# Altium footprint library UCP.PcbLib: 222 footprints (part 1 of 14)
Each footprint in its own frame and in the unit in brackets; x right, y up, seen from the top. Pads: shape width x height; smd on the part's side, far side on the other; paste and mask are expansions set on the pad; w line width, h text height; cw(c..) or ccw(c..) is an arc to the next point about the centre after c.
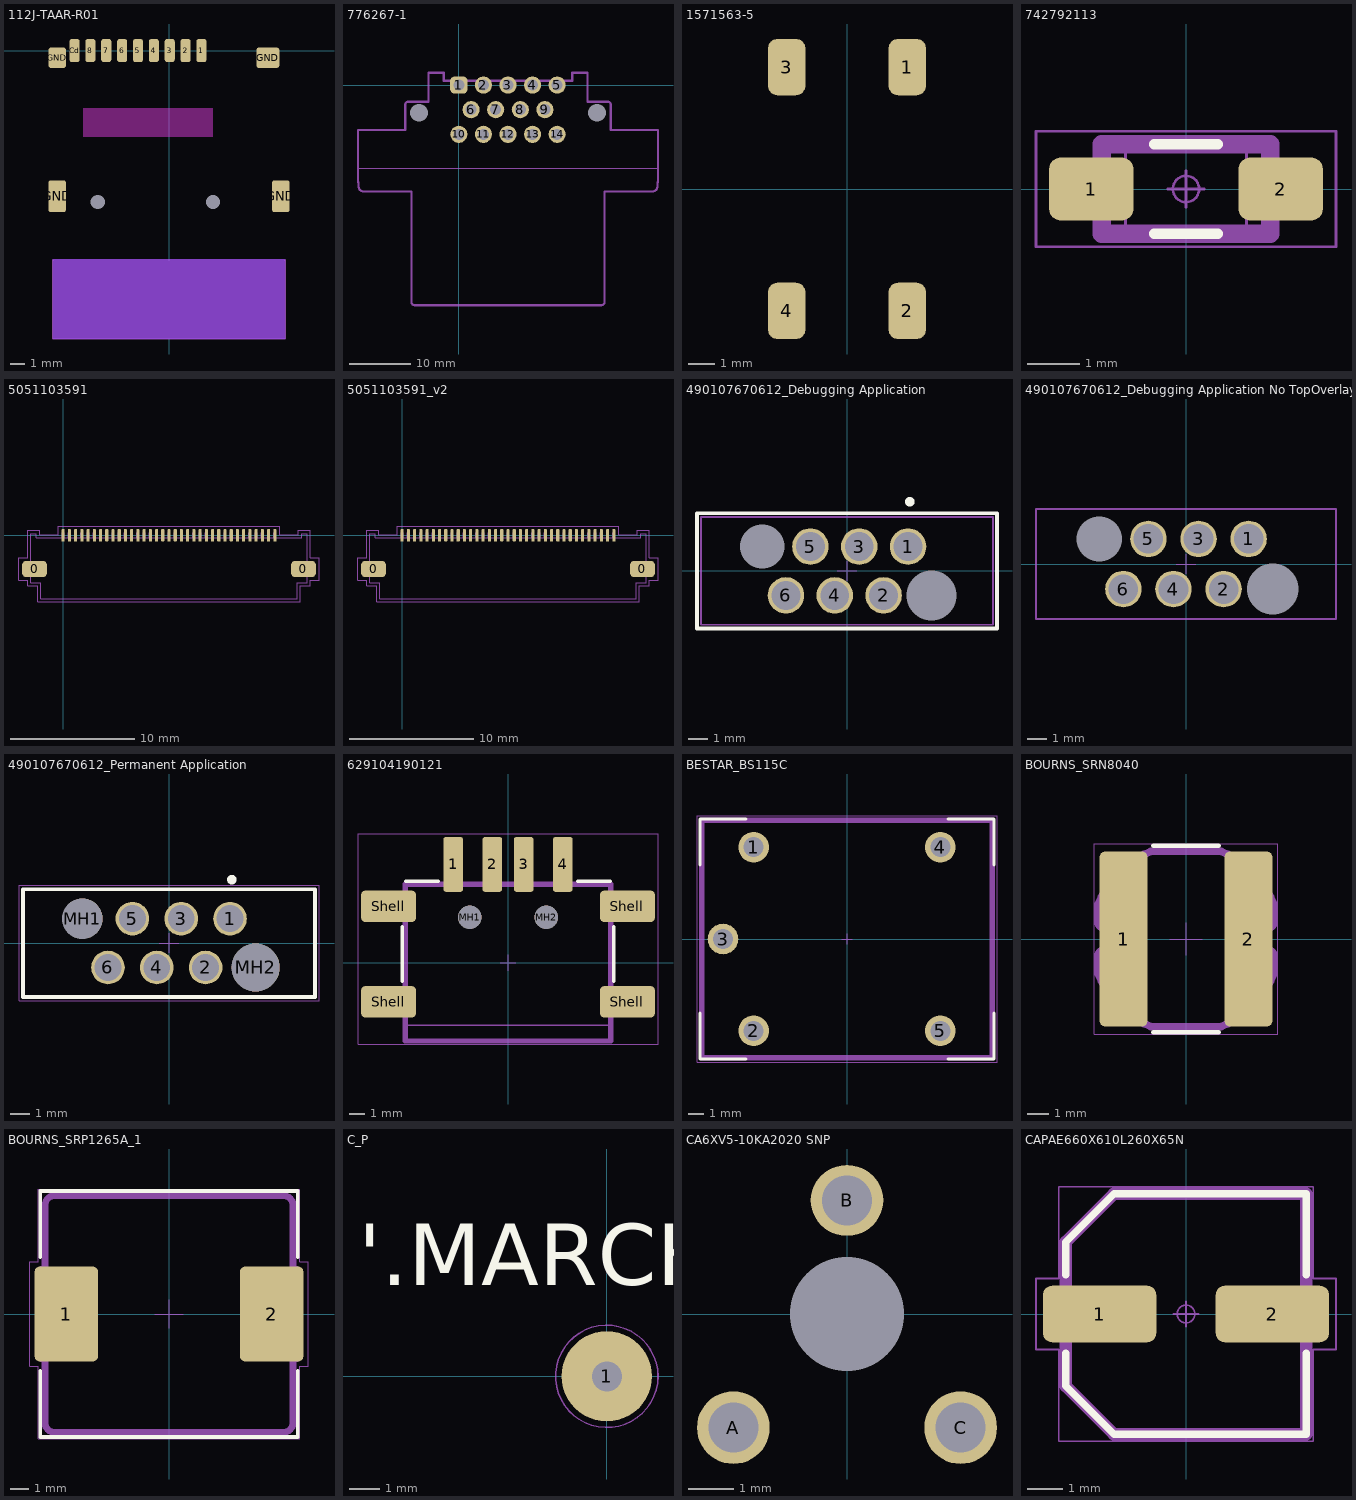
[diagram p0: the footprints below, top view; thin cyan lines are the x and y axes]

## 112J-TAAR-R01 [mm] "CARD HOLDER"
height 1.85
pads (15):
  rrect50% 0.7x1.6 smd: 1(2.25,0) 2(1.15,0) 3(0.05,0) 4(-1.05,0) 5(-2.15,0) 6(-3.25,0) 7(-4.35,0) 8(-5.45,0) Cd(-6.55,0)
  rrect25% 1.2x2.2 smd: GND(-7.75,-10.1) GND(7.75,-10.1)
  rrect25% 1.2x1.4 smd: GND(-7.744,-0.5)
  rrect25% 1.6x1.4 smd: GND(6.85,-0.5)
  round 0 hole 1 unplated mask+0.25: MH1(-4.95,-10.5) MH2(3.05,-10.5)
Top Layer keep-out:
  rectangle: -8.05,-20 8.05,-14.5
  rectangle: -5.95,-6 3.05,-4
Bottom Layer keep-out:
  rectangle: -8.05,-20 8.05,-14.5
Top Designator:
  text ".Designator" at -4.511,-0.453 h2
Top Dimensions:
  lines w0.1: -8.05,-20 8.05,-20 8.05,-14.5 -8.05,-14.5 -8.05,-20
3D body "112J-TDAR-R01.stp": height 1.9, standoff -0.55, extent -8.05,-14.5 8.05,0.503

## 776267-1 [mm]
pads (16):
  round 0 hole 2.9 unplated mask+0.25: 0(-6.5,-4.5) 0(22.5,-4.5)
  rrect50% 2.8x2.8 hole 1.8: 1(0,0)
  round 2.8 hole 1.8: 2(4,0) 3(8,0) 4(12,0) 5(16,0) 6(2,-4) 7(6,-4) 8(10,-4) 9(14,-4) 10(0,-8) 11(4,-8) 12(8,-8) 13(12,-8) 14(16,-8)
Top Designator:
  text ".Designator" at -4.511,-0.453 h2
Top Assembly:
  lines w0.35: -16.4,-15.8 -16.3,-15.8 -16.3,-16.5 ccw(c-15.5,-16.5) -15.5,-17.3 -11.4,-17.3 -7.7,-17.3 -7.7,-35.3 ccw(c-7.2,-35.3) -7.2,-35.8 -1.5,-35.8 3.456,-35.8 3.473,-35.8 5.327,-35.8 5.344,-35.8 10.656,-35.8 10.673,-35.8 12.527,-35.8 12.544,-35.8 17.5,-35.8 23.2,-35.8 ccw(c23.2,-35.3) 23.7,-35.3 23.7,-17.3 27.4,-17.3 31.5,-17.3 ccw(c31.5,-16.5) 32.3,-16.5 32.3,-15.8 32.4,-15.8 32.4,-14.3 32.4,-13.434 32.4,-9 32.4,-7.3 32.375,-7.3 30.301,-7.3 29.932,-7.3 29.58,-7.3 29.201,-7.3 28.985,-7.3 27.485,-7.3 24.725,-7.3 24.725,-3.2 ccw(c24.225,-3.2) 24.225,-2.7 20.925,-2.7 20.925,0 20.925,2 20.025,2 18.445,2 18.445,0.7 -2.445,0.7 -2.445,2 -4.025,2 -4.925,2 -4.925,0 -4.925,-2.7 -8.225,-2.7 ccw(c-8.225,-3.2) -8.725,-3.2 -8.725,-7.3 -11.485,-7.3 -12.985,-7.3 -13.201,-7.3 -14.701,-7.3 -16.375,-7.3 -16.4,-7.3 -16.4,-9 -16.4,-15.8
Top Component Outline:
  lines w0.2: -16.4,-13.51 32.324,-13.51
3D body "776273-1.stp": height 27.77, standoff -4.33, extent -16.4,-35.8 32.4,2

## 1571563-5 [mm] "Tactile Switches"
height 13.6
pads (4):
  rrect50% 1.4x2.1 smd: 1(2.25,4.55) 2(2.25,-4.55) 3(-2.25,4.55) 4(-2.25,-4.55)
Top Designator:
  text ".Designator" at -4.511,-0.453 h2
3D body "c-1571563-5-v-3d.stp": height 13.07, standoff 0, extent -3,-5 3,5

## 742792113 [mm] "Ferrit bead, Chip; 3.2 mm L X 1.60 mm W X 1.1 mm H body"
height 1.1
pads (2):
  rrect36% 1.6x1.2 smd: 1(-1.8,0) 2(1.8,0)
Top Overlay:
  lines w0.2: -0.605,-0.85 0.605,-0.85 ; -0.605,0.85 0.605,0.85
Top Designator:
  text ".Designator" at 0,0 h1.2
Top Assembly:
  lines w0.35: -1.6,-0.85 1.6,-0.85 1.6,0.85 -1.6,0.85 -1.6,-0.85
Top Courtyard:
  circle w0.05: c0,0 r0.25
  lines w0.05: -0.35,0 0.35,0 ; 0,-0.35 0,0.35 ; -2.85,-1.1 2.85,-1.1 2.85,1.1 -2.85,1.1 -2.85,-1.1
Top Component Outline:
  lines w0.05: -1.55,-0.8 1.55,-0.8 1.55,0.8 -1.55,0.8 -1.55,-0.8
Top Component Terminal:
  lines w0.05: -1.55,-0.8 -1.55,0.8 -1.15,0.8 -1.15,-0.8 -1.55,-0.8 ; 1.15,-0.8 1.55,-0.8 1.55,0.8 1.15,0.8 1.15,-0.8
3D body "RESC310X160X65L40.STEP": height 0.65, standoff 0, extent -1.55,-0.8 1.55,0.8

## 5051103591 [mm] "Connector"
pads (37):
  rrect50% 2x1.3 smd mask+0.05: 0(-2.3,-2.7) 0(19.3,-2.7)
  rrect50% 0.25x1 smd mask+0.05: 1(0,0) 2(0.5,0) 3(1,0) 4(1.5,0) 5(2,0) 6(2.5,0) 7(3,0) 8(3.5,0) 9(4,0) 10(4.5,0) 11(5,0) 12(5.5,0) 13(6,0) 14(6.5,0) 15(7,0) 16(7.5,0) 17(8,0) 18(8.5,0) 19(9,0) 20(9.5,0) 21(10,0) 22(10.5,0) 23(11,0) 24(11.5,0) 25(12,0) 26(12.5,0) 27(13,0) 28(13.5,0) 29(14,0) 30(14.5,0) 31(15,0) 32(15.5,0) 33(16,0) 34(16.5,0) 35(17,0)
Top Solder:
  region: -0.1,0.55 17.1,0.55 17.12,0.55 17.157,0.535 17.185,0.507 17.2,0.47 17.2,0.45 17.2,-0.45 17.2,-0.47 17.185,-0.507 17.157,-0.535 17.12,-0.55 17.1,-0.55 -0.1,-0.55 -0.12,-0.55 -0.157,-0.535 -0.185,-0.507 -0.2,-0.47 -0.2,-0.45 -0.2,0.45 -0.2,0.47 -0.185,0.507 -0.157,0.535 -0.12,0.55
Top Designator:
  text ".Designator" at -4.511,-0.453 h2
Top Assembly:
  lines w0.05: 0,-0.2 0,0.2 ; 0.5,-0.2 0.5,0.2 ; 1,-0.2 1,0.2 ; 1.5,-0.2 1.5,0.2 ; 2,-0.2 2,0.2 ; 2.5,-0.2 2.5,0.2 ; 3,-0.2 3,0.2 ; 3.5,-0.2 3.5,0.2 ; 4,-0.2 4,0.2 ; 4.5,-0.2 4.5,0.2 ; 5,-0.2 5,0.2 ; 5.5,-0.2 5.5,0.2 ; 6,-0.2 6,0.2 ; 6.5,-0.2 6.5,0.2 ; 7,-0.2 7,0.2 ; 7.5,-0.2 7.5,0.2 ; 8,-0.2 8,0.2 ; 8.5,-0.2 8.5,0.2 ; 9,-0.2 9,0.2 ; 9.5,-0.2 9.5,0.2 ; 10,-0.2 10,0.2 ; 10.5,-0.2 10.5,0.2 ; 11,-0.2 11,0.2 ; 11.5,-0.2 11.5,0.2 ; 12,-0.2 12,0.2 ; 12.5,-0.2 12.5,0.2 ; 13,-0.2 13,0.2 ; 13.5,-0.2 13.5,0.2 ; 14,-0.2 14,0.2 ; 14.5,-0.2 14.5,0.2 ; 15,-0.2 15,0.2 ; 15.5,-0.2 15.5,0.2 ; 16,-0.2 16,0.2 ; 16.5,-0.2 16.5,0.2 ; 17,-0.2 17,0.2 ; -3,-3.15 -2.6,-3.15 -2.6,-3.8 -1.8,-3.8 -1.8,-5.1 18.8,-5.1 18.8,-3.8 19.6,-3.8 19.6,-3.15 20,-3.15 20,-2.25 19.6,-2.25 19.6,0.15 19.15,0.15 19.15,-0.2 -2.15,-0.2 -2.15,0.15 -2.6,0.15 -2.6,-2.25 -3,-2.25 -3,-3.15
Top Courtyard:
  lines w0.05: -3.55,-3.6 -3.55,-1.8 -2.85,-1.8 -2.85,0.4 -1.9,0.4 -1.9,0.05 -0.4,0.05 -0.4,0.75 17.4,0.75 17.4,0.05 18.9,0.05 18.9,0.4 19.85,0.4 19.85,-1.8 20.55,-1.8 20.55,-3.6 19.85,-3.6 19.85,-4.05 19.05,-4.05 19.05,-5.35 -2.05,-5.35 -2.05,-4.05 -2.85,-4.05 -2.85,-3.6 -3.55,-3.6
Top Component Outline:
  lines w0.02: -2.6,-3.8 -2.6,0.15 -2.15,0.15 -2.15,-0.2 19.15,-0.2 19.15,0.15 19.6,0.15 19.6,-3.8 18.8,-3.8 18.8,-5.1 -1.8,-5.1 -1.8,-3.8 -2.6,-3.8
Top Component Terminal:
  drawing of 156 lines, arcs and shapes, not listed
3D body "5051103591.stp": height 1.88, standoff -0.02, extent -3,-5.1 20,0.2

## 5051103591_v2 [mm] "Connector"
pads (37):
  rrect50% 2x1.3 smd mask+0.05: 0(-2.3,-2.7) 0(19.3,-2.7)
  rrect50% 0.25x1 smd mask+0.05: 1(0,0) 2(0.5,0) 3(1,0) 4(1.5,0) 5(2,0) 6(2.5,0) 7(3,0) 8(3.5,0) 9(4,0) 10(4.5,0) 11(5,0) 12(5.5,0) 13(6,0) 14(6.5,0) 15(7,0) 16(7.5,0) 17(8,0) 18(8.5,0) 19(9,0) 20(9.5,0) 21(10,0) 22(10.5,0) 23(11,0) 24(11.5,0) 25(12,0) 26(12.5,0) 27(13,0) 28(13.5,0) 29(14,0) 30(14.5,0) 31(15,0) 32(15.5,0) 33(16,0) 34(16.5,0) 35(17,0)
Top Designator:
  text ".Designator" at -4.511,-0.453 h2
Top Assembly:
  lines w0.05: 0,-0.2 0,0.2 ; 0.5,-0.2 0.5,0.2 ; 1,-0.2 1,0.2 ; 1.5,-0.2 1.5,0.2 ; 2,-0.2 2,0.2 ; 2.5,-0.2 2.5,0.2 ; 3,-0.2 3,0.2 ; 3.5,-0.2 3.5,0.2 ; 4,-0.2 4,0.2 ; 4.5,-0.2 4.5,0.2 ; 5,-0.2 5,0.2 ; 5.5,-0.2 5.5,0.2 ; 6,-0.2 6,0.2 ; 6.5,-0.2 6.5,0.2 ; 7,-0.2 7,0.2 ; 7.5,-0.2 7.5,0.2 ; 8,-0.2 8,0.2 ; 8.5,-0.2 8.5,0.2 ; 9,-0.2 9,0.2 ; 9.5,-0.2 9.5,0.2 ; 10,-0.2 10,0.2 ; 10.5,-0.2 10.5,0.2 ; 11,-0.2 11,0.2 ; 11.5,-0.2 11.5,0.2 ; 12,-0.2 12,0.2 ; 12.5,-0.2 12.5,0.2 ; 13,-0.2 13,0.2 ; 13.5,-0.2 13.5,0.2 ; 14,-0.2 14,0.2 ; 14.5,-0.2 14.5,0.2 ; 15,-0.2 15,0.2 ; 15.5,-0.2 15.5,0.2 ; 16,-0.2 16,0.2 ; 16.5,-0.2 16.5,0.2 ; 17,-0.2 17,0.2 ; -3,-3.15 -3,-2.25 -2.6,-2.25 -2.6,0.15 -2.15,0.15 -2.15,-0.2 19.15,-0.2 19.15,0.15 19.6,0.15 19.6,-2.25 20,-2.25 20,-3.15 19.6,-3.15 19.6,-3.8 18.8,-3.8 18.8,-5.1 -1.8,-5.1 -1.8,-3.8 -2.6,-3.8 -2.6,-3.15 -3,-3.15
Top Courtyard:
  lines w0.05: -3.55,-3.6 -2.85,-3.6 -2.85,-4.05 -2.05,-4.05 -2.05,-5.35 19.05,-5.35 19.05,-4.05 19.85,-4.05 19.85,-3.6 20.55,-3.6 20.55,-1.8 19.85,-1.8 19.85,0.4 18.9,0.4 18.9,0.05 17.4,0.05 17.4,0.75 -0.4,0.75 -0.4,0.05 -1.9,0.05 -1.9,0.4 -2.85,0.4 -2.85,-1.8 -3.55,-1.8 -3.55,-3.6
Top Component Outline:
  lines w0.02: -2.6,-3.8 -1.8,-3.8 -1.8,-5.1 18.8,-5.1 18.8,-3.8 19.6,-3.8 19.6,0.15 19.15,0.15 19.15,-0.2 -2.15,-0.2 -2.15,0.15 -2.6,0.15 -2.6,-3.8
Top Component Terminal:
  drawing of 156 lines, arcs and shapes, not listed
3D body "5051103591.stp": height 1.88, standoff -0.02, extent -3,-5.1 20,0.2

## 490107670612_Debugging Application [mm] "REDFIT IDC SKEDD Connector, pitch 2.54mm, 6p"
height 10.45
pads (8):
  round 1.9 hole 1.5 mask+0.055: 1(3.175,1.27) 2(1.905,-1.27) 3(0.635,1.27) 4(-0.635,-1.27) 5(-1.905,1.27) 6(-3.175,-1.27)
  round 0 hole 2.3 unplated mask+0.1: MH1(-4.405,1.27)
  round 0 hole 2.6 unplated mask+0.1: MH2(4.405,-1.27)
Top Overlay:
  circle w0.25: c3.27,3.6 r0.125
  lines w0.2: -7.805,-3 -7.805,3 7.805,3 7.805,-3 -7.805,-3
Top Solder:
  region: 3.473,-2.315 3.593,-2.422 3.877,-2.577 4.189,-2.663 4.512,-2.675 4.83,-2.614 5.125,-2.482 5.382,-2.286 5.588,-2.036 5.731,-1.747 5.805,-1.432 5.805,-1.108 5.731,-0.793 5.588,-0.504 5.382,-0.254 5.125,-0.058 4.83,0.074 4.512,0.135 4.189,0.123 3.877,0.037 3.593,-0.118 3.473,-0.225 3.354,-0.316 3.084,-0.44 2.789,-0.479 2.495,-0.429 2.357,-0.372 2.242,-0.315 1.991,-0.26 1.734,-0.271 1.487,-0.347 1.268,-0.482 1.09,-0.668 0.965,-0.892 0.9,-1.141 0.9,-1.399 0.965,-1.648 1.09,-1.872 1.268,-2.058 1.487,-2.193 1.734,-2.269 1.991,-2.28 2.242,-2.225 2.357,-2.168 2.495,-2.111 2.789,-2.061 3.084,-2.1 3.354,-2.224
  region: -2.474,0.441 -2.36,0.364 -2.101,0.275 -1.827,0.259 -1.558,0.317 -1.315,0.445 -1.116,0.633 -0.974,0.868 -0.9,1.133 -0.9,1.407 -0.974,1.672 -1.116,1.907 -1.315,2.095 -1.558,2.223 -1.827,2.281 -2.101,2.265 -2.36,2.176 -2.474,2.099 -2.475,2.101 -2.608,2.041 -2.893,1.984 -3.183,2.011 -3.453,2.12 -3.573,2.203 -3.68,2.299 -3.934,2.437 -4.212,2.513 -4.501,2.525 -4.784,2.47 -5.048,2.352 -5.277,2.177 -5.461,1.954 -5.589,1.695 -5.655,1.414 -5.655,1.126 -5.589,0.845 -5.461,0.586 -5.277,0.363 -5.048,0.188 -4.784,0.07 -4.501,0.015 -4.212,0.027 -3.934,0.103 -3.68,0.241 -3.573,0.337 -3.453,0.42 -3.183,0.529 -2.893,0.556 -2.608,0.499 -2.475,0.439
Bottom Solder:
  region: 3.473,-2.315 3.593,-2.422 3.877,-2.577 4.189,-2.663 4.512,-2.675 4.83,-2.614 5.125,-2.482 5.382,-2.286 5.588,-2.036 5.731,-1.747 5.805,-1.432 5.805,-1.108 5.731,-0.793 5.588,-0.504 5.382,-0.254 5.125,-0.058 4.83,0.074 4.512,0.135 4.189,0.123 3.877,0.037 3.593,-0.118 3.473,-0.225 3.354,-0.316 3.084,-0.44 2.789,-0.479 2.495,-0.429 2.357,-0.372 2.242,-0.315 1.991,-0.26 1.734,-0.271 1.487,-0.347 1.268,-0.482 1.09,-0.668 0.965,-0.892 0.9,-1.141 0.9,-1.399 0.965,-1.648 1.09,-1.872 1.268,-2.058 1.487,-2.193 1.734,-2.269 1.991,-2.28 2.242,-2.225 2.357,-2.168 2.495,-2.111 2.789,-2.061 3.084,-2.1 3.354,-2.224
  region: -2.474,0.441 -2.36,0.364 -2.101,0.275 -1.827,0.259 -1.558,0.317 -1.315,0.445 -1.116,0.633 -0.974,0.868 -0.9,1.133 -0.9,1.407 -0.974,1.672 -1.116,1.907 -1.315,2.095 -1.558,2.223 -1.827,2.281 -2.101,2.265 -2.36,2.176 -2.474,2.099 -2.475,2.101 -2.608,2.041 -2.893,1.984 -3.183,2.011 -3.453,2.12 -3.573,2.203 -3.68,2.299 -3.934,2.437 -4.212,2.513 -4.501,2.525 -4.784,2.47 -5.048,2.352 -5.277,2.177 -5.461,1.954 -5.589,1.695 -5.655,1.414 -5.655,1.126 -5.589,0.845 -5.461,0.586 -5.277,0.363 -5.048,0.188 -4.784,0.07 -4.501,0.015 -4.212,0.027 -3.934,0.103 -3.68,0.241 -3.573,0.337 -3.453,0.42 -3.183,0.529 -2.893,0.556 -2.608,0.499 -2.475,0.439
Top Assembly:
  lines w0.1: -7.605,-2.8 -7.605,2.8 7.605,2.8 7.605,-2.8 -7.605,-2.8
Top Courtyard:
  lines w0.05: -0.5,0 0.5,0 ; 0,-0.5 0,0.5 ; -7.805,-3 -7.805,3 7.805,3 7.805,-3 -7.805,-3
3D body "490107670612.stp": height 10.5, standoff -4.45, extent -7.605,-2.8 7.605,2.8

## 490107670612_Debugging Application No TopOverlay [mm] "REDFIT IDC SKEDD Connector, pitch 2.54mm, 6p"
pads (8):
  round 1.85 hole 1.5: 1(3.175,1.27) 2(1.905,-1.27) 3(0.635,1.27) 4(-0.635,-1.27) 5(-1.905,1.27) 6(-3.175,-1.27)
  round 0 hole 2.3 unplated mask+0.1: MH1(-4.405,1.27)
  round 0 hole 2.6 unplated mask+0.1: MH2(4.405,-1.27)
Top Solder:
  region: -2.474,0.441 -2.36,0.364 -2.101,0.275 -1.827,0.259 -1.558,0.317 -1.315,0.445 -1.116,0.633 -0.974,0.868 -0.9,1.133 -0.9,1.407 -0.974,1.672 -1.116,1.907 -1.315,2.095 -1.558,2.223 -1.827,2.281 -2.101,2.265 -2.36,2.176 -2.474,2.099 -2.475,2.101 -2.608,2.041 -2.893,1.984 -3.183,2.011 -3.453,2.12 -3.573,2.203 -3.68,2.299 -3.934,2.437 -4.212,2.513 -4.501,2.525 -4.784,2.47 -5.048,2.352 -5.277,2.177 -5.461,1.954 -5.589,1.695 -5.655,1.414 -5.655,1.126 -5.589,0.845 -5.461,0.586 -5.277,0.363 -5.048,0.188 -4.784,0.07 -4.501,0.015 -4.212,0.027 -3.934,0.103 -3.68,0.241 -3.573,0.337 -3.453,0.42 -3.183,0.529 -2.893,0.556 -2.608,0.499 -2.475,0.439
  region: 3.473,-2.315 3.593,-2.422 3.877,-2.577 4.189,-2.663 4.512,-2.675 4.83,-2.614 5.125,-2.482 5.382,-2.286 5.588,-2.036 5.731,-1.747 5.805,-1.432 5.805,-1.108 5.731,-0.793 5.588,-0.504 5.382,-0.254 5.125,-0.058 4.83,0.074 4.512,0.135 4.189,0.123 3.877,0.037 3.593,-0.118 3.473,-0.225 3.354,-0.316 3.084,-0.44 2.789,-0.479 2.495,-0.429 2.357,-0.372 2.242,-0.315 1.991,-0.26 1.734,-0.271 1.487,-0.347 1.268,-0.482 1.09,-0.668 0.965,-0.892 0.9,-1.141 0.9,-1.399 0.965,-1.648 1.09,-1.872 1.268,-2.058 1.487,-2.193 1.734,-2.269 1.991,-2.28 2.242,-2.225 2.357,-2.168 2.495,-2.111 2.789,-2.061 3.084,-2.1 3.354,-2.224
Bottom Solder:
  region: -2.474,0.441 -2.36,0.364 -2.101,0.275 -1.827,0.259 -1.558,0.317 -1.315,0.445 -1.116,0.633 -0.974,0.868 -0.9,1.133 -0.9,1.407 -0.974,1.672 -1.116,1.907 -1.315,2.095 -1.558,2.223 -1.827,2.281 -2.101,2.265 -2.36,2.176 -2.474,2.099 -2.475,2.101 -2.608,2.041 -2.893,1.984 -3.183,2.011 -3.453,2.12 -3.573,2.203 -3.68,2.299 -3.934,2.437 -4.212,2.513 -4.501,2.525 -4.784,2.47 -5.048,2.352 -5.277,2.177 -5.461,1.954 -5.589,1.695 -5.655,1.414 -5.655,1.126 -5.589,0.845 -5.461,0.586 -5.277,0.363 -5.048,0.188 -4.784,0.07 -4.501,0.015 -4.212,0.027 -3.934,0.103 -3.68,0.241 -3.573,0.337 -3.453,0.42 -3.183,0.529 -2.893,0.556 -2.608,0.499 -2.475,0.439
  region: 3.473,-2.315 3.593,-2.422 3.877,-2.577 4.189,-2.663 4.512,-2.675 4.83,-2.614 5.125,-2.482 5.382,-2.286 5.588,-2.036 5.731,-1.747 5.805,-1.432 5.805,-1.108 5.731,-0.793 5.588,-0.504 5.382,-0.254 5.125,-0.058 4.83,0.074 4.512,0.135 4.189,0.123 3.877,0.037 3.593,-0.118 3.473,-0.225 3.354,-0.316 3.084,-0.44 2.789,-0.479 2.495,-0.429 2.357,-0.372 2.242,-0.315 1.991,-0.26 1.734,-0.271 1.487,-0.347 1.268,-0.482 1.09,-0.668 0.965,-0.892 0.9,-1.141 0.9,-1.399 0.965,-1.648 1.09,-1.872 1.268,-2.058 1.487,-2.193 1.734,-2.269 1.991,-2.28 2.242,-2.225 2.357,-2.168 2.495,-2.111 2.789,-2.061 3.084,-2.1 3.354,-2.224
Top Assembly:
  lines w0.1: -7.605,-2.8 7.605,-2.8 7.605,2.8 -7.605,2.8 -7.605,-2.8
Top Courtyard:
  lines w0.05: -0.5,0 0.5,0 ; 0,-0.5 0,0.5
Top Component Outline:
  lines w0.1: -7.605,-2.8 -7.605,2.8 7.605,2.8 7.605,-2.8 -7.605,-2.8

## 490107670612_Permanent Application [mm] "REDFIT IDC SKEDD Connector, pitch 2.54mm, 6p"
height 10.45
pads (8):
  round 1.75 hole 1.4: 1(3.175,1.27) 2(1.905,-1.27) 3(0.635,1.27) 4(-0.635,-1.27) 5(-1.905,1.27) 6(-3.175,-1.27)
  round 2.1 hole 2.1 unplated: MH1(-4.505,1.27)
  round 2.5 hole 2.5 unplated: MH2(4.505,-1.27)
Top Overlay:
  circle w0.25: c3.27,3.3 r0.125
  lines w0.2: -7.605,-2.8 -7.605,2.8 7.605,2.8 7.605,-2.8 -7.605,-2.8
Top Designator:
  text ".Designator" at -4.511,-0.453 h2
Top Assembly:
  lines w0.1: -7.605,-2.8 7.605,-2.8 7.605,2.8 -7.605,2.8 -7.605,-2.8
Top Courtyard:
  lines w0.05: -0.5,0 0.5,0 ; 0,-0.5 0,0.5 ; -7.805,-3 7.805,-3 7.805,3 -7.805,3 -7.805,-3
3D body "490107670612.stp": height 10.5, standoff -4.45, extent -7.605,-2.8 7.605,2.8

## 629104190121 [mm] "USB 2.0 Type A Horizontal SMT Short Type"
height 6.3
pads (10):
  rrect25% 1.25x3.5 smd: 1(-3.5,6.28) 2(-1,6.28) 3(1,6.28) 4(3.5,6.28)
  round 1.5 hole 1.5 unplated: MH1(-2.45,2.9) MH2(2.45,2.9)
  rrect25% 3.5x2 smd: Shell(-7.63,-2.5) Shell(-7.63,3.6) Shell(7.63,-2.5) Shell(7.63,3.6)
Top Overlay:
  lines w0.2: -6.75,-1.2 -6.75,2.3 ; -6.55,5.2 -4.45,5.2 ; 4.45,5.2 6.55,5.2 ; 6.75,-1.2 6.75,2.3
Dimensions:
  lines w0.1: -6.55,-4 6.55,-4
  text "PCB Edge" at -1.7,-4.85 h0.61
Top Designator:
  text ".Designator" at -4.511,-0.453 h2
Top Dimensions:
  lines w0.1: -6.55,-3.25 -8.25,-3.25 -8.25,-1.75 -6.55,-1.75 ; -6.55,2.85 -8.25,2.85 -8.25,4.35 -6.55,4.35 ; -3.775,5 -3.775,6.1 -3.225,6.1 -3.225,5 ; -1.275,5 -1.275,6.1 -0.725,6.1 -0.725,5 ; 0.725,5 0.725,6.1 1.275,6.1 1.275,5 ; 3.225,5 3.225,6.1 3.775,6.1 3.775,5 ; 6.55,-3.25 8.25,-3.25 8.25,-1.75 6.55,-1.75 ; 6.55,2.85 8.25,2.85 8.25,4.35 6.55,4.35 ; -6.55,-5 6.55,-5 6.55,5 -6.55,5 -6.55,-5
  text ".Designator" at -1.75,-0.75 h1.5
Top Assembly:
  lines w0.35: -6.55,-5 -6.55,5 6.55,5 6.55,-5 -6.55,-5
Top Courtyard:
  lines w0.05: -0.5,0 0.5,0 ; 0,-0.5 0,0.5 ; -9.58,-5.2 9.58,-5.2 9.58,8.23 -9.58,8.23 -9.58,-5.2
Top Component Terminal:
  lines w0.1: -6.55,-3.25 -8.25,-3.25 -8.25,-1.75 -6.55,-1.75 ; -6.55,2.85 -8.25,2.85 -8.25,4.35 -6.55,4.35 ; -3.775,5 -3.775,6.1 -3.225,6.1 -3.225,5 ; -1.275,5 -1.275,6.1 -0.725,6.1 -0.725,5 ; 0.725,5 0.725,6.1 1.275,6.1 1.275,5 ; 3.225,5 3.225,6.1 3.775,6.1 3.775,5 ; 6.55,-3.25 8.25,-3.25 8.25,-1.75 6.55,-1.75 ; 6.55,2.85 8.25,2.85 8.25,4.35 6.55,4.35
3D body "629104190121.stp": height 6.35, standoff -0.12, extent -8.25,-5 8.25,6.109

## BESTAR_BS115C [mm]
height 15.2
pads (5):
  round 2 hole 1.3: 1(-6.1,6) 2(-6.1,-6) 3(-8.1,0) 4(6.1,6) 5(6.1,-6)
Top Overlay:
  lines w0.2: -9.6,-4.85 -9.6,-7.85 -6.6,-7.85 ; -9.6,4.85 -9.6,7.85 -6.6,7.85 ; 6.6,-7.85 9.6,-7.85 9.6,-4.85 ; 6.6,7.85 9.6,7.85 9.6,4.85
Top Assembly:
  lines w0.35: -9.5,-7.75 9.5,-7.75 9.5,7.75 -9.5,7.75 -9.5,-7.75
Top Courtyard:
  lines w0.05: -0.35,0 0.35,0 ; 0,-0.35 0,0.35 ; -9.8,-8.05 9.8,-8.05 9.8,8.05 -9.8,8.05 -9.8,-8.05
Top Component Outline:
  lines w0.025: -9.5,-7.75 9.5,-7.75 9.5,7.75 -9.5,7.75 -9.5,-7.75
Top Component Terminal:
  lines w0.025: -8.3,-0.5 -7.9,-0.5 -7.9,0.5 -8.3,0.5 -8.3,-0.5 ; -6.4,-6.3 -5.8,-6.3 -5.8,-5.7 -6.4,-5.7 -6.4,-6.3 ; -6.4,5.7 -5.8,5.7 -5.8,6.3 -6.4,6.3 -6.4,5.7 ; 5.6,-6.2 6.6,-6.2 6.6,-5.8 5.6,-5.8 5.6,-6.2 ; 5.6,5.8 6.6,5.8 6.6,6.2 5.6,6.2 5.6,5.8
3D body "BESTAR_BS-115C.stp": height 15.2, standoff -3.5, extent -9.5,-7.75 9.5,7.75

## BOURNS_SRN8040 [mm]
height 4
pads (2):
  rrect25% 2.2x8 smd: 1(-2.85,0) 2(2.85,0)
Top Overlay:
  lines w0.2: -1.5,-4.25 1.5,-4.25 ; -1.5,4.25 1.5,4.25
Top Assembly:
  lines w0.35: -4,-1.6 ccw(c0,0) -1.6,-4 1.6,-4 ccw(c0,0) 4,-1.6 4,-0.731 ccw(c3.8,-0.731) 3.883,-0.549 3.693,-0.463 cw(c3.776,-0.281) 3.576,-0.281 3.576,0.281 cw(c3.776,0.281) 3.693,0.463 3.883,0.549 ccw(c3.8,0.731) 4,0.731 4,1.6 ccw(c0,0) 1.6,4 -1.6,4 ccw(c0,0) -4,1.6 -4,0.731 ccw(c-3.8,0.731) -3.883,0.549 -3.693,0.463 cw(c-3.776,0.281) -3.576,0.281 -3.576,-0.281 cw(c-3.776,-0.281) -3.693,-0.463 -3.883,-0.549 ccw(c-3.8,-0.731) -4,-0.731 -4,-1.6
Top Courtyard:
  lines w0.05: -0.75,0 0.75,0 ; 0,-0.75 0,0.75 ; -4.2,-4.35 -4.2,4.35 4.2,4.35 4.2,-4.35 -4.2,-4.35
Top Component Outline:
  lines w0.025: -4,-1.6 ccw(c0,0) -1.6,-4 1.6,-4 ccw(c0,0) 4,-1.6 4,-0.731 ccw(c3.8,-0.731) 3.883,-0.549 3.693,-0.463 cw(c3.776,-0.281) 3.576,-0.281 3.576,0.281 cw(c3.776,0.281) 3.693,0.463 3.883,0.549 ccw(c3.8,0.731) 4,0.731 4,1.6 ccw(c0,0) 1.6,4 -1.6,4 ccw(c0,0) -4,1.6 -4,0.731 ccw(c-3.8,0.731) -3.883,0.549 -3.693,0.463 cw(c-3.776,0.281) -3.576,0.281 -3.576,-0.281 cw(c-3.776,-0.281) -3.693,-0.463 -3.883,-0.549 ccw(c-3.8,-0.731) -4,-0.731 -4,-1.6
3D body "BOURNS_SRN8040.stp": height 4, standoff 0, extent -4.009,-4 4.009,4

## BOURNS_SRP1265A_1 [mm]
height 6.5
pads (2):
  rrect15% 3.35x5 smd: 1(-5.425,0) 2(5.425,0)
Top Overlay:
  lines w0.2: -6.8,-3 -6.8,-6.5 6.8,-6.5 6.8,-3 ; -6.8,3 -6.8,6.5 6.8,6.5 ; 6.8,6.5 6.8,3 6.8,6.5
Top Assembly:
  lines w0.35: -6.55,-2.35 -6.75,-2.35 -6.75,-1.15 -6.75,-0.9 -6.75,0.1 -6.75,0.35 -6.75,2.35 -6.55,2.35 ; 6.55,-2.35 6.75,-2.35 6.75,-1.15 6.75,-0.9 6.75,0.1 6.75,0.35 6.75,2.35 6.55,2.35 ; -6.55,-5.75 ccw(c-6.05,-5.75) -6.05,-6.25 6.05,-6.25 ccw(c6.05,-5.75) 6.55,-5.75 6.55,5.75 ccw(c6.05,5.75) 6.05,6.25 -6.05,6.25 ccw(c-6.05,5.75) -6.55,5.75 -6.55,-5.75
Top Courtyard:
  lines w0.05: -0.75,0 0.75,0 ; 0,-0.75 0,0.75 ; -7.35,-2.75 -7.35,2.75 -6.9,2.75 -6.9,6.6 6.9,6.6 6.9,2.75 7.35,2.75 7.35,-2.75 6.9,-2.75 6.9,-6.6 -6.9,-6.6 -6.9,-2.75 -7.35,-2.75
Top Component Outline:
  lines w0.025: -6.55,-5.75 ccw(c-6.05,-5.75) -6.05,-6.25 ; -6.55,-5.75 ccw(c-6.05,-5.75) -6.05,-6.25 ; -6.55,-5.75 -6.55,5.75 ; -6.55,-5.75 -6.55,5.75 ; -6.55,5.75 cw(c-6.05,5.75) -6.05,6.25 ; -6.55,5.75 cw(c-6.05,5.75) -6.05,6.25 ; -6.05,-6.25 6.05,-6.25 ; -6.05,-6.25 6.05,-6.25 ; -6.05,6.25 6.05,6.25 ; -6.05,6.25 6.05,6.25 ; 6.05,-6.25 ccw(c6.05,-5.75) 6.55,-5.75 ; 6.05,-6.25 ccw(c6.05,-5.75) 6.55,-5.75 ; 6.05,6.25 cw(c6.05,5.75) 6.55,5.75 ; 6.05,6.25 cw(c6.05,5.75) 6.55,5.75 ; 6.55,-5.75 6.55,5.75 ; 6.55,-5.75 6.55,5.75
3D body "SUMIDA_SRP1265A_1.stp": height 6.5, standoff 0, extent -6.75,-6.25 6.75,6.25

## C_P [mm]
pads (1):
  round 3 hole 1: 1(0,0)
Top Overlay:
  text "'.MARCK-1'" at -8.262,2.339 h3.5
Bottom Overlay:
  text "'.MARCK-1'" at 8.262,2.339 h3.5
Top Designator:
  text ".Designator" at 1.7,-0.85 h1.2
Top Assembly:
  circle w0.2: c0,0 r1.1
Bottom Assembly:
  circle w0.2: c0,0 r1.1
Top Courtyard:
  circle w0.05: c0,0 r1.7
  circle w0.05: c0,0 r1.1

## CA6XV5-10KA2020 SNP [mm]
pads (4):
  round 0 hole 2.5 unplated mask+0.25: 0(0,0)
  round 1.6 hole 1.1 mask+0.055: A(-2.5,-2.5) C(2.5,-2.5)
  oval 1.6x1.55 hole 1.1 mask+0.055: B(0,2.5)
Top Designator:
  text ".Designator" at -4.511,-0.453 h2
3D body "CA6XV5-10KA2020SNP.stp": height 4.4, standoff -2.55, extent -3.275,-3.542 3.275,3.25

## CAPAE660X610L260X65N [mm] "Capacitor, Aluminum Electrolytic; 6.60 mm L X 6.60 mm W X 6.10 mm H body"
height 6.1
pads (2):
  rrect31% 3.2x1.6 smd: 1(-2.44,0) 2(2.44,0)
Top Overlay:
  lines w0.2: -3.4,-1.1 -3.4,-2.04 -2.04,-3.4 3.4,-3.4 3.4,-1.1 ; -3.4,1.1 -3.4,2.04 -2.04,3.4 3.4,3.4 3.4,1.1
Top Designator:
  text ".Designator" at -4.511,-0.453 h2
Top Assembly:
  lines w0.35: -3.4,-2.04 -3.4,2.04 -2.04,3.4 3.4,3.4 3.4,-3.4 -2.04,-3.4 -3.4,-2.04
Top Courtyard:
  circle w0.05: c0,0 r0.25
  lines w0.05: -0.35,0 0.35,0 ; 0,-0.35 0,0.35 ; -4.24,-1 -3.6,-1 -3.6,-3.6 3.6,-3.6 3.6,-1 4.24,-1 4.24,1 3.6,1 3.6,3.6 -3.6,3.6 -3.6,1 -4.24,1 -4.24,-1
Top Component Outline:
  lines w0.05: -3.3,-1.98 -3.3,1.98 -1.98,3.3 3.3,3.3 3.3,-3.3 -1.98,-3.3 -3.3,-1.98
Top Component Terminal:
  lines w0.05: -3.5,-0.325 -3.5,0.325 -0.9,0.325 -0.9,-0.325 -3.5,-0.325 ; 0.9,-0.325 3.5,-0.325 3.5,0.325 0.9,0.325 0.9,-0.325
3D body "CAPAE660X610L260X65.STEP": height 6.1, standoff 0, extent -3.5,-3.3 3.5,3.3